# Altium footprint library 2450AT07A0100001T.PcbLib: 1 footprints
Each footprint in its own frame and in the unit in brackets; x right, y up, seen from the top. Pads: shape width x height; smd on the part's side, far side on the other; paste and mask are expansions set on the pad; w line width, h text height; cw(c..) or ccw(c..) is an arc to the next point about the centre after c.
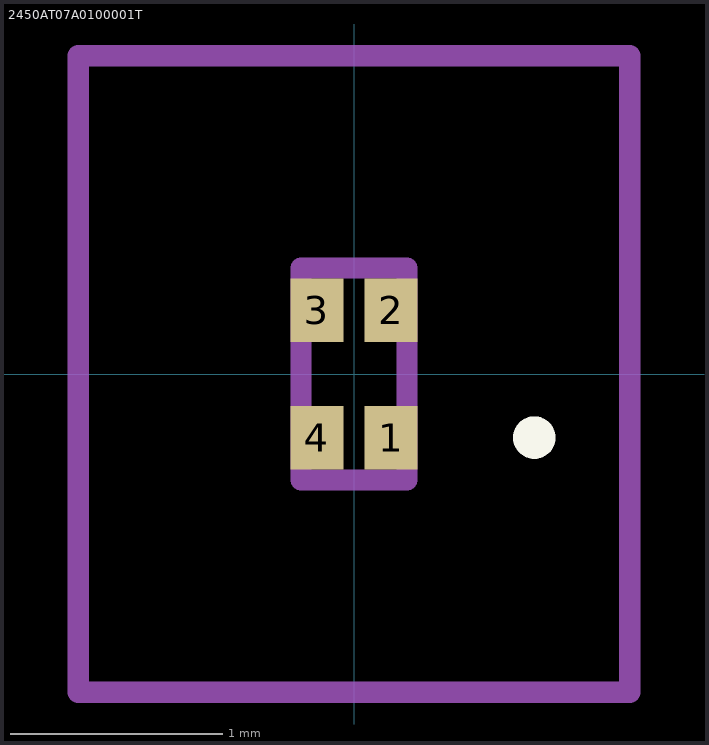
[diagram p0: the footprint, top view; thin cyan lines are the x and y axes]

## 2450AT07A0100001T [mm]
pads (4):
  rect 0.25x0.3 smd: 1(0.175,-0.3) 2(0.175,0.3) 3(-0.175,0.3) 4(-0.175,-0.3)
Top Overlay:
  lines w0.1: 0.8,-0.3 cw(c0.85,-0.3) 0.9,-0.3 ; 0.8,-0.3 0.8,-0.3 ; 0.8,-0.3 ccw(c0.85,-0.3) 0.9,-0.3 ; 0.8,-0.3 cw(c0.85,-0.3) 0.9,-0.3 ; 0.9,-0.3 0.9,-0.3 ; 0.9,-0.3 0.9,-0.3
Mechanical 15:
  lines w0.1: -0.25,-0.5 0.25,-0.5 0.25,0.5 -0.25,0.5 -0.25,-0.5
Mechanical 20:
  lines w0.1: -1.3,-1.5 1.3,-1.5 1.3,1.5 -1.3,1.5 -1.3,-1.5